# Altium footprint library PTS120630V012.PcbLib: 3 footprints
Each footprint in its own frame and in the unit in brackets; x right, y up, seen from the top. Pads: shape width x height; smd on the part's side, far side on the other; paste and mask are expansions set on the pad; w line width, h text height; cw(c..) or ccw(c..) is an arc to the next point about the centre after c.
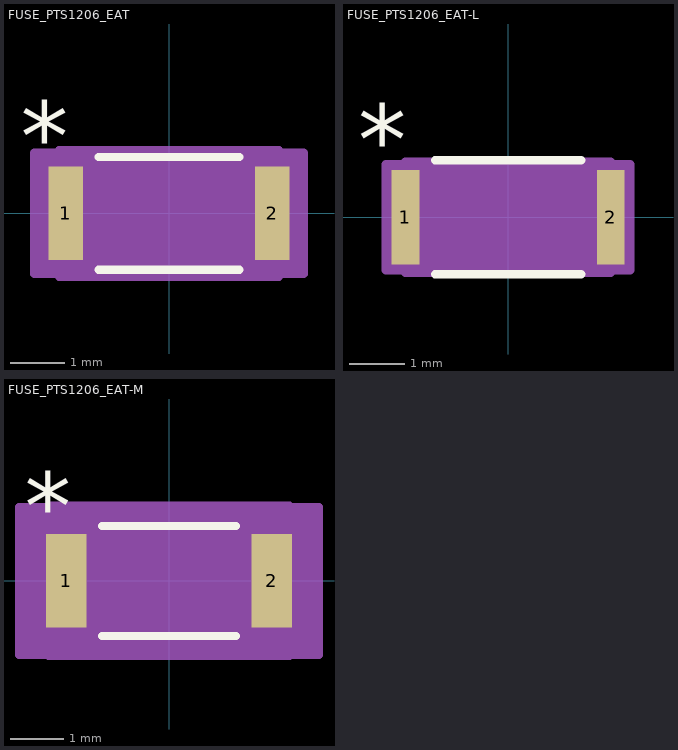
[diagram p0: the footprints below, top view; thin cyan lines are the x and y axes]

## FUSE_PTS1206_EAT [mm]
pads (2):
  rect 0.634x1.703 smd paste+0 mask+0: 1(-1.886,0) 2(1.886,0)
Top Overlay:
  lines w0.152: -1.287,-1.029 1.287,-1.029 ; -1.287,1.029 1.287,1.029
  text "*" at -2.705,0.775 h1.27
  text ".Designator" at -3.492,-0.635 h1.27
Mechanical 13:
  lines w0.025: -1.753,0.648 -1.499,0.902 ; -1.753,-0.902 -1.753,-0.127 ccw(c-1.753,0) -1.753,0.127 -1.753,0.902 1.753,0.902 1.753,0.127 ccw(c1.753,0) 1.753,-0.127 1.753,-0.902 -1.753,-0.902
  text ".Designator" at -3.492,-0.635 h1.27
  text "*" at -1.435,-0.241 h1.27
Mechanical 15:
  region: -2.007,-1.106 -2.457,-1.106 -2.457,1.106 -2.007,1.106 -2.007,1.156 2.007,1.156 2.007,1.106 2.457,1.106 2.457,-1.106 2.007,-1.106 2.007,-1.156 -2.007,-1.156
  lines w0.152: -2.457,-1.106 -2.457,1.106 -2.007,1.106 -2.007,1.156 2.007,1.156 2.007,1.106 2.457,1.106 2.457,-1.106 2.007,-1.106 2.007,-1.156 -2.007,-1.156 -2.007,-1.106 -2.457,-1.106

## FUSE_PTS1206_EAT-L [mm]
pads (2):
  rect 0.504x1.703 smd paste+0 mask+0: 1(-1.851,0) 2(1.851,0)
Top Overlay:
  lines w0.152: -1.317,-1.029 1.317,-1.029 ; -1.317,1.029 1.317,1.029
  text "*" at -2.705,0.775 h1.27
  text ".Designator" at -3.492,-0.635 h1.27
Mechanical 13:
  lines w0.025: -1.753,0.648 -1.499,0.902 ; -1.753,-0.902 -1.753,-0.127 ccw(c-1.753,0) -1.753,0.127 -1.753,0.902 1.753,0.902 1.753,0.127 ccw(c1.753,0) 1.753,-0.127 1.753,-0.902 -1.753,-0.902
  text ".Designator" at -3.492,-0.635 h1.27
  text "*" at -1.435,-0.241 h1.27
Mechanical 15:
  region: -1.854,-0.953 -2.204,-0.953 -2.204,0.953 -1.854,0.953 -1.854,1.003 1.854,1.003 1.854,0.953 2.204,0.953 2.204,-0.953 1.854,-0.953 1.854,-1.003 -1.854,-1.003
  lines w0.152: -2.204,-0.953 -2.204,0.953 -1.854,0.953 -1.854,1.003 1.854,1.003 1.854,0.953 2.204,0.953 2.204,-0.953 1.854,-0.953 1.854,-1.003 -1.854,-1.003 -1.854,-0.953 -2.204,-0.953

## FUSE_PTS1206_EAT-M [mm]
pads (2):
  rect 0.754x1.753 smd paste+0 mask+0: 1(-1.926,0) 2(1.926,0)
Top Overlay:
  lines w0.152: -1.253,-1.029 1.253,-1.029 ; -1.253,1.029 1.253,1.029
  text "*" at -2.705,0.775 h1.27
  text ".Designator" at -3.492,-0.635 h1.27
Mechanical 13:
  lines w0.025: -1.753,0.648 -1.499,0.902 ; -1.753,-0.902 -1.753,-0.127 ccw(c-1.753,0) -1.753,0.127 -1.753,0.902 1.753,0.902 1.753,0.127 ccw(c1.753,0) 1.753,-0.127 1.753,-0.902 -1.753,-0.902
  text ".Designator" at -3.492,-0.635 h1.27
  text "*" at -1.435,-0.241 h1.27
Mechanical 15:
  region: -2.261,-1.385 -2.811,-1.385 -2.811,1.385 -2.261,1.385 -2.261,1.41 2.261,1.41 2.261,1.385 2.811,1.385 2.811,-1.385 2.261,-1.385 2.261,-1.41 -2.261,-1.41
  lines w0.152: -2.811,-1.385 -2.811,1.385 -2.261,1.385 -2.261,1.41 2.261,1.41 2.261,1.385 2.811,1.385 2.811,-1.385 2.261,-1.385 2.261,-1.41 -2.261,-1.41 -2.261,-1.385 -2.811,-1.385